# Altium schematic symbol library BlackfinSOM.SchLib: 36 symbols
Pins are listed as number, name and electrical type; pins without a type are passive.

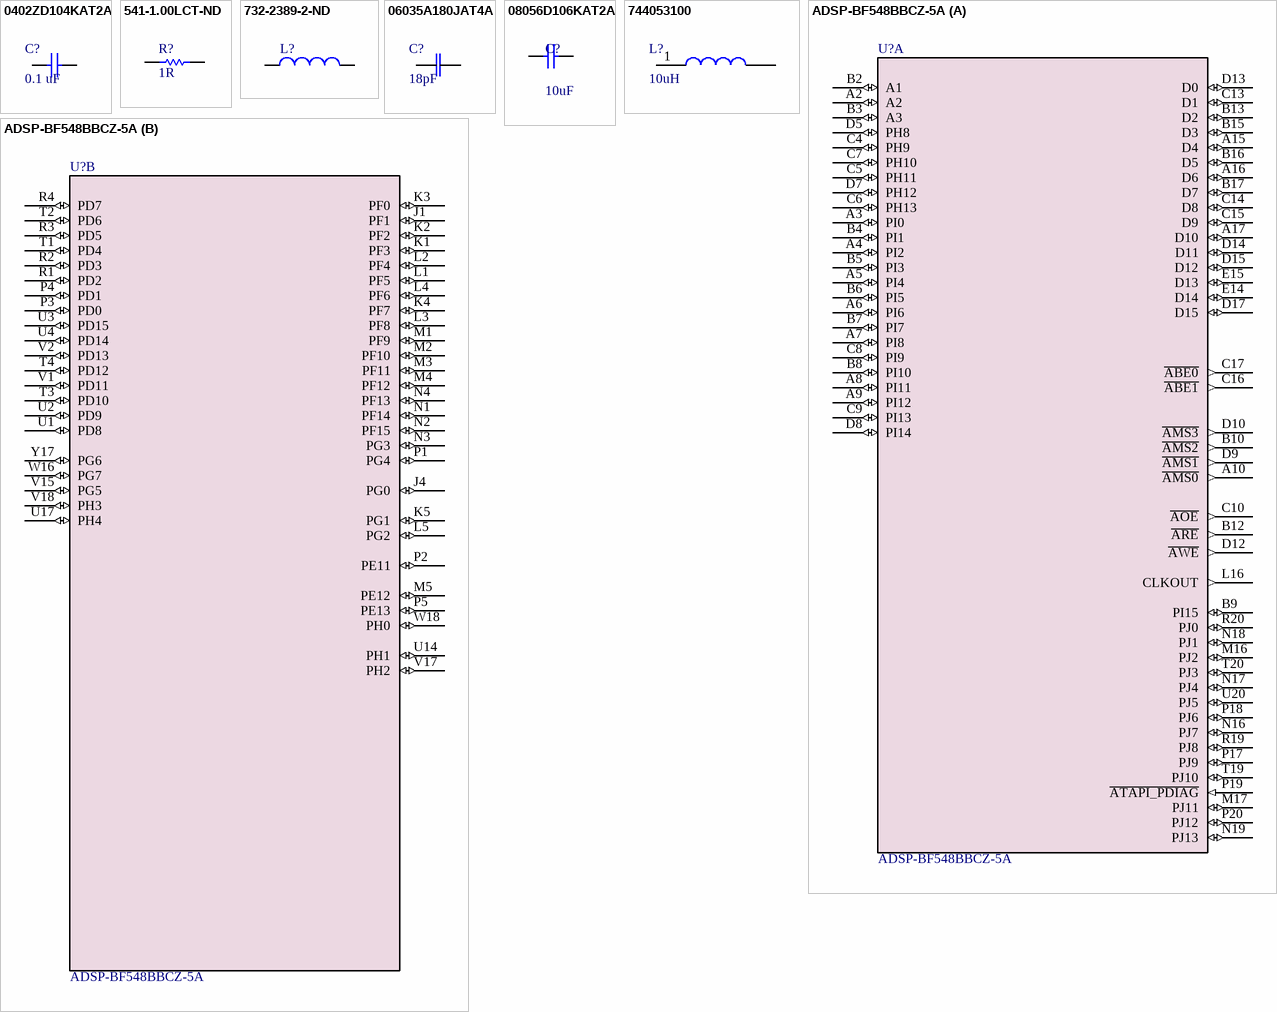
[diagram p0: symbols 0402ZD104KAT2A to ADSP-BF548BBCZ-5A]

## 0402ZD104KAT2A
designator C?, comment 0.1 uF
Chip Capacitor, 0.1 uF, +/- 10%, 10 V, -55 to 85 degC, 0402 (1005 Metric), RoHS, Tape and Reel; Voltage Rating: 10 V; Capacitance: 100 nF; Case\Package: 0402; Type (Capacitors): X5R; Min Operating Temperature: -55 degC; Max Operating Temperature: 85 degC; ComponentLink2URL: http://datasheets.avx.com/cx5r.pdf; Packaging: Cut Tape; Tolerance: 10%; Pins: 2; Case Code (Imperial): 0402; PackageDescription: 2-Pin Surface Mount Device, Body 1 x 0.5 mm; ComponentLink1Description: Manufacturer URL; DatasheetVersion: 05/2016; Width: 0.5 mm; ComponentLink1URL: http://www.avx.com/; Length: 1 mm; Package Quantity: 1; PackageReference: 0402; Mount: Surface Mount; Radiation Hardening: No; REACH SVHC: No SVHC; Mounting Technology: Surface Mount; ComponentLink2Description: Datasheet; RoHSCompliant: true; Case Code (Metric): 1005; Height: 0.56 mm; Voltage Rating (DC): 10 V
footprint CAP0402
pins: 1, 2

## 541-1.00LCT-ND
designator R?, comment 1R
RES SMD 1 OHM 1% 1/16W 0402; Manufacturer: Vishay; Manufacturer Part Number: CRCW04021R00FNED; Power Rating: 63mW; Voltage Rating: 50V; Temperature Coefficient: 200ppm/°C; Supplier 1: Digi-Key; RoHS: Yes; Category: Chip SMD Resistors; Stock 1: 7772; Pricing 1: 1=0.10000, 10=0.05000, 100=0.02040, 1000=0.00914, 2500=0.00794, 5000=0.00656 (USD); Mount: Surface Mount; Case/Package: 0402; Number of Pins: 2; Weight: 2.3E-05oz; Case Code (Metric): 1005; Case Code (Imperial): 0402; Contact Plating: Tin; Min Operating Temperature: -55°C; Max Operating Temperature: 155°C; Resistance: 1R; Tolerance: 1%; Packaging: Tape and Reel; Package Quantity: 10000; Resistor Type: Thick Film; Number of Terminations: 2; Termination: SMD/SMT; Max Power Dissipation: 63mW; Voltage Rating (DC): 50V; Features: Automotive AEC-Q200; Length: 1mm; Width: 0.02inch; Height: 0.016inch; Depth: 0.5mm; Radiation Hardening: No; REACH SVHC: Unknown; Military Standard: Not; Lead Free: Lead Free; ComponentLink1URL: https://datasheet.ciiva.com/2560/dcrcwe3-2560101.pdf?src-supplier=Digi-Key; ComponentLink1Description: https://datasheet.ciiva.com/2560/dcrcwe3-2560101.pdf?src-supplier=Digi-Key; ComponentLink2URL: https://datasheet.ciiva.com/6027/1697337-6027861.pdf?src-supplier=Farnell; ComponentLink2Description: https://datasheet.ciiva.com/6027/1697337-6027861.pdf?src-supplier=Farnell; ComponentLink3URL: https://datasheet.ciiva.com/2560/dcrcwe3-2560102.pdf?src-supplier=Digi-Key; ComponentLink3Description: https://datasheet.ciiva.com/2560/dcrcwe3-2560102.pdf?src-supplier=Digi-Key; ComponentLink4URL: https://datasheet.ciiva.com/2560/dcrcwe3-2560103.pdf?src-supplier=Digi-Key; ComponentLink4Description: https://datasheet.ciiva.com/2560/dcrcwe3-2560103.pdf?src-supplier=Digi-Key; ComponentLink5URL: https://datasheet.ciiva.com/3256/dcrcwe3-3256199.pdf?src-supplier=Avnet; ComponentLink5Description: https://datasheet.ciiva.com/3256/dcrcwe3-3256199.pdf?src-supplier=Avnet; ComponentLink6URL: https://datasheet.ciiva.com/3256/dcrcwe3-3256200.pdf?src-supplier=Avnet; ComponentLink6Description: https://datasheet.ciiva.com/3256/dcrcwe3-3256200.pdf?src-supplier=Avnet; ComponentLink7URL: https://datasheet.ciiva.com/5552/dcrcwe3-109170-5552232.pdf?src-supplier=Mouser; ComponentLink7Description: https://datasheet.ciiva.com/5552/dcrcwe3-109170-5552232.pdf?src-supplier=Mouser; ComponentLink8URL: https://datasheet.ciiva.com/16436/dcrcwe3-16436173.pdf?src-supplier=Future+Electronics; ComponentLink8Description: https://datasheet.ciiva.com/16436/dcrcwe3-16436173.pdf?src-supplier=Future+Electronics; ComponentLink9URL: https://datasheet.ciiva.com/7841/125364-7841807.pdf?src-supplier=Element14; ComponentLink9Description: https://datasheet.ciiva.com/7841/125364-7841807.pdf?src-supplier=Element14
footprint RES0402
pins: 1, 2
1 alternate drawing of the same symbol

## 732-2389-2-ND
designator L?, comment 600 Ohms @ 100MHz  (value not drawn)
Ferritperle, 0603 [Metrisch 1608], 600 ohm, 500 mA, WE-CBF HF Series, 0.35 ohm, ± 25%; Manufacturer: Wurth Electronics; Manufacturer Part Number: 742863160; Impedance: 600 Ohm; Core Material: Ferrite; Resistance: 350mR; Max Current Rating: 500mA; Number of Lines: 1; PackageDescription: Chip Inductor, 2-Leads, Body 1.6 x 0.8 mm; PackageReference: SMD-0603; DatasheetVersion: ver 2, Aug-2009; ComponentLink1URL: http://www.we-online.com; ComponentLink2URL: http://www.we-online.de/katalog/media/pdf/742863160.pdf; ComponentLink2Description: Datasheet; ComponentLink1Description: Manufacturer Link; PackageVersion: 2009; Supplier 1: Digi-Key; RoHS: Yes; Category: Ferrite Beads and Chips; Stock 1: 26940; Pricing 1: 1=0.22000, 50=0.21200, 100=0.20200, 500=0.18100, 1000=0.17100, 2000=0.16100 (USD); Mount: Surface Mount; Case/Package: SMD/SMT; Number of Pins: 2; Case Code (Metric): 1608; Case Code (Imperial): 0603; Min Operating Temperature: -55°C; Max Operating Temperature: 125°C; Package Quantity: 1; Packaging: Tape and Reel; Tolerance: 25%; Max DC Current: 500mA; DC Resistance (DCR): 350mR; Termination: SMD/SMT; Test Frequency: 100MHz; Length: 1.6mm; Width: 0.8mm; Height: 0.8mm; Depth: 0.8mm; REACH SVHC: Unknown; Lead Free: Lead Free; ComponentLink3URL: https://datasheet.ciiva.com/4939/742863160-51474-4939408.pdf?src-supplier=Mouser; ComponentLink3Description: https://datasheet.ciiva.com/4939/742863160-51474-4939408.pdf?src-supplier=Mouser; ComponentLink4URL: https://datasheet.ciiva.com/23763/742863160-23763056.pdf?src-supplier=Newark; ComponentLink4Description: https://datasheet.ciiva.com/23763/742863160-23763056.pdf?src-supplier=Newark; ComponentLink5URL: https://datasheet.ciiva.com/30490/0900766b812a6726-30490032.pdf?src-supplier=RSComponents; ComponentLink5Description: https://datasheet.ciiva.com/30490/0900766b812a6726-30490032.pdf?src-supplier=RSComponents; ComponentLink6URL: https://datasheet.ciiva.com/6212/742863160-6212664.pdf?src-supplier=Digi-Key; ComponentLink6Description: https://datasheet.ciiva.com/6212/742863160-6212664.pdf?src-supplier=Digi-Key; ComponentLink7URL: https://datasheet.ciiva.com/1466/1696149-1466636.pdf?src-supplier=Element14; ComponentLink7Description: https://datasheet.ciiva.com/1466/1696149-1466636.pdf?src-supplier=Element14; ComponentLink8URL: https://datasheet.ciiva.com/6212/742863160-6212666.pdf?src-supplier=Digi-Key; ComponentLink8Description: https://datasheet.ciiva.com/6212/742863160-6212666.pdf?src-supplier=Digi-Key; ComponentLink9URL: https://datasheet.ciiva.com/6212/742863160-6212667.pdf?src-supplier=Digi-Key; ComponentLink9Description: https://datasheet.ciiva.com/6212/742863160-6212667.pdf?src-supplier=Digi-Key; ComponentLink10URL: https://datasheet.ciiva.com/22711/1696149-22711452.pdf?src-supplier=Element14; ComponentLink10Description: https://datasheet.ciiva.com/22711/1696149-22711452.pdf?src-supplier=Element14
footprint IND-0603 (Chip Inductor, 2-Leads, Body 1.6x0.8mm)
pins: 1, 2

## 06035A180JAT4A
designator C?, comment 18pF
18pF ±5% 50V Ceramic Capacitor C0G, NP0 0603 (1608 Metric); Manufacturer: AVX Corporation; Manufacturer Product Number: 06035A180JAT4A; Capacitance: AVX_2016-12-14_1; Digi-Key Part Number: 478-10294-2-ND; Supplier: AVX Corporation; Package / Case: 0603 (1608 Metric)
footprint CAP0603
pins: 1, 2

## 08056D106KAT2A
designator C?, comment 10uF
Cap Ceramic 10uF 6.3V X5R 10% SMD 0805 85C Embossed T/R; Part Number: 08056D106KAT2A; Manufacturer: AVX Interconnect / Elco; Insulation Resistance: 500MR; Supplier 1: Digi-Key; Category: Ceramic Capacitors; Manufacturer Part Number: 08056D106KAT2A; RoHS: Yes; Stock 1: 132568; Pricing 1: 1=0.24000, 10=0.16300, 50=0.09800, 100=0.08280, 500=0.05662, 1000=0.05009 (USD); Mount: Surface Mount,PCB; Case/Package: 0805; Number of Pins: 2; Case Code (Imperial): 0805; Case Code (Metric): 2012; Dielectric Material: Ceramic; Min Operating Temperature: -55°C; Max Operating Temperature: 85°C; Capacitance: 10uF; Tolerance: 10%; Dielectric: X5R; Voltage Rating (DC): 6.3V; Packaging: Tape and Reel; Voltage: 6.3V; Package Quantity: 1; Voltage Rating: 6.3V; Termination: SMD/SMT; Length: 2.01mm; Width: 1.25mm; Height: 1.4mm; Depth: 1.25mm; Thickness: 0.055inch; Radiation Hardening: No; REACH SVHC: No SVHC; Lead Free: Lead Free; ComponentLink1URL: https://datasheet.ciiva.com/11788/0900766b80def1a5-11788549.pdf?src-supplier=RSComponents; ComponentLink1Description: https://datasheet.ciiva.com/11788/0900766b80def1a5-11788549.pdf?src-supplier=RSComponents
footprint CAP0805
pins: 1, 2
1 alternate drawing of the same symbol

## 744053100
designator L?, comment 10uH
10µH Shielded Wirewound Inductor 1.5A 70mOhm Max 2323 (5858 Metric); Manufacturer: Würth Elektronik; Manufacturer Product Number: 744053100; Current Rating: 1,5A; Digi-Key Part Number: 732-1043-2-ND; Package / Case: 2323 (5858 Metric); Inductance: 10µH
footprint IND_5818_WE-TPC
pins: 1, 2

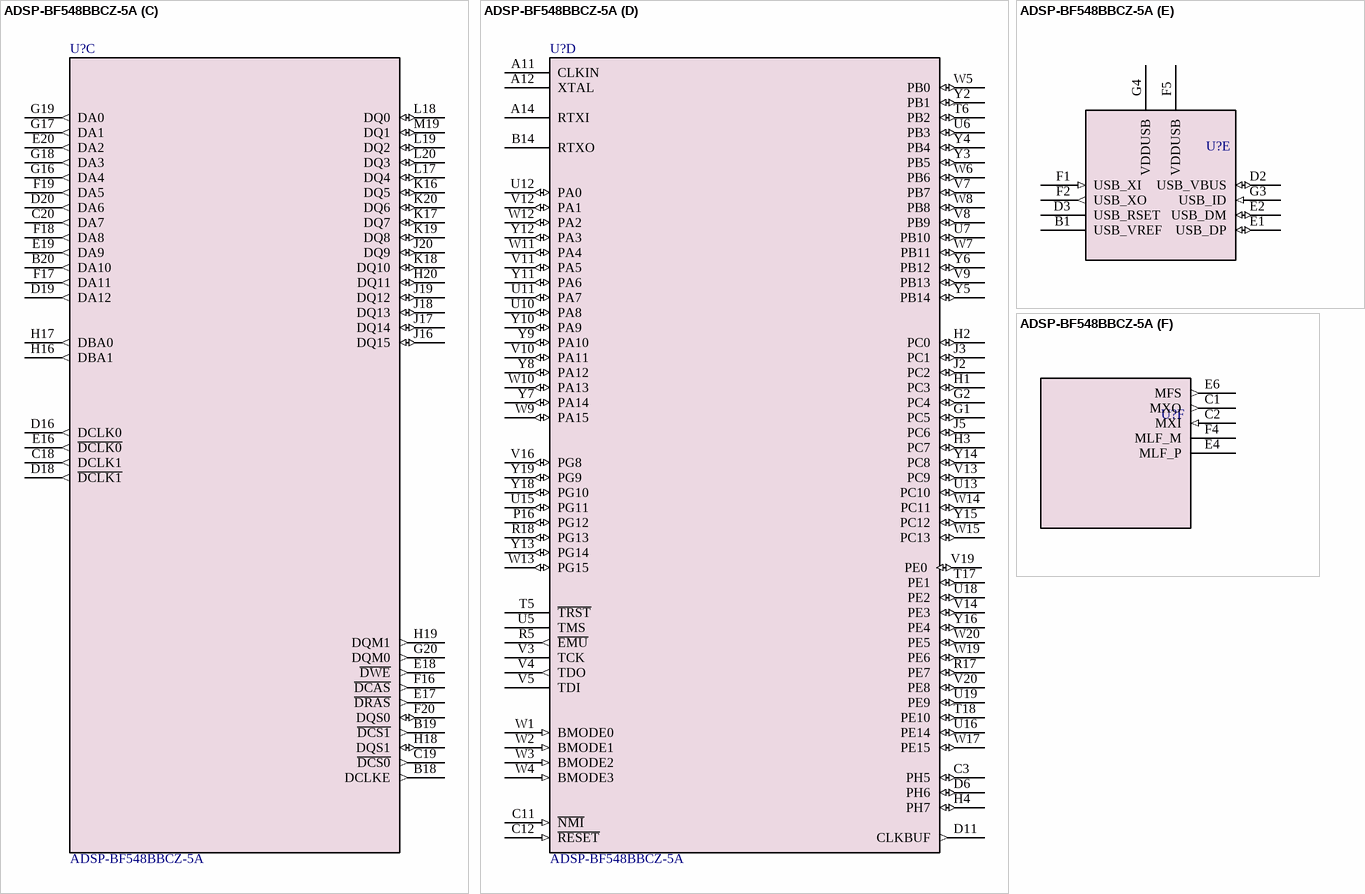
[diagram p1: symbol ADSP-BF548BBCZ-5A]

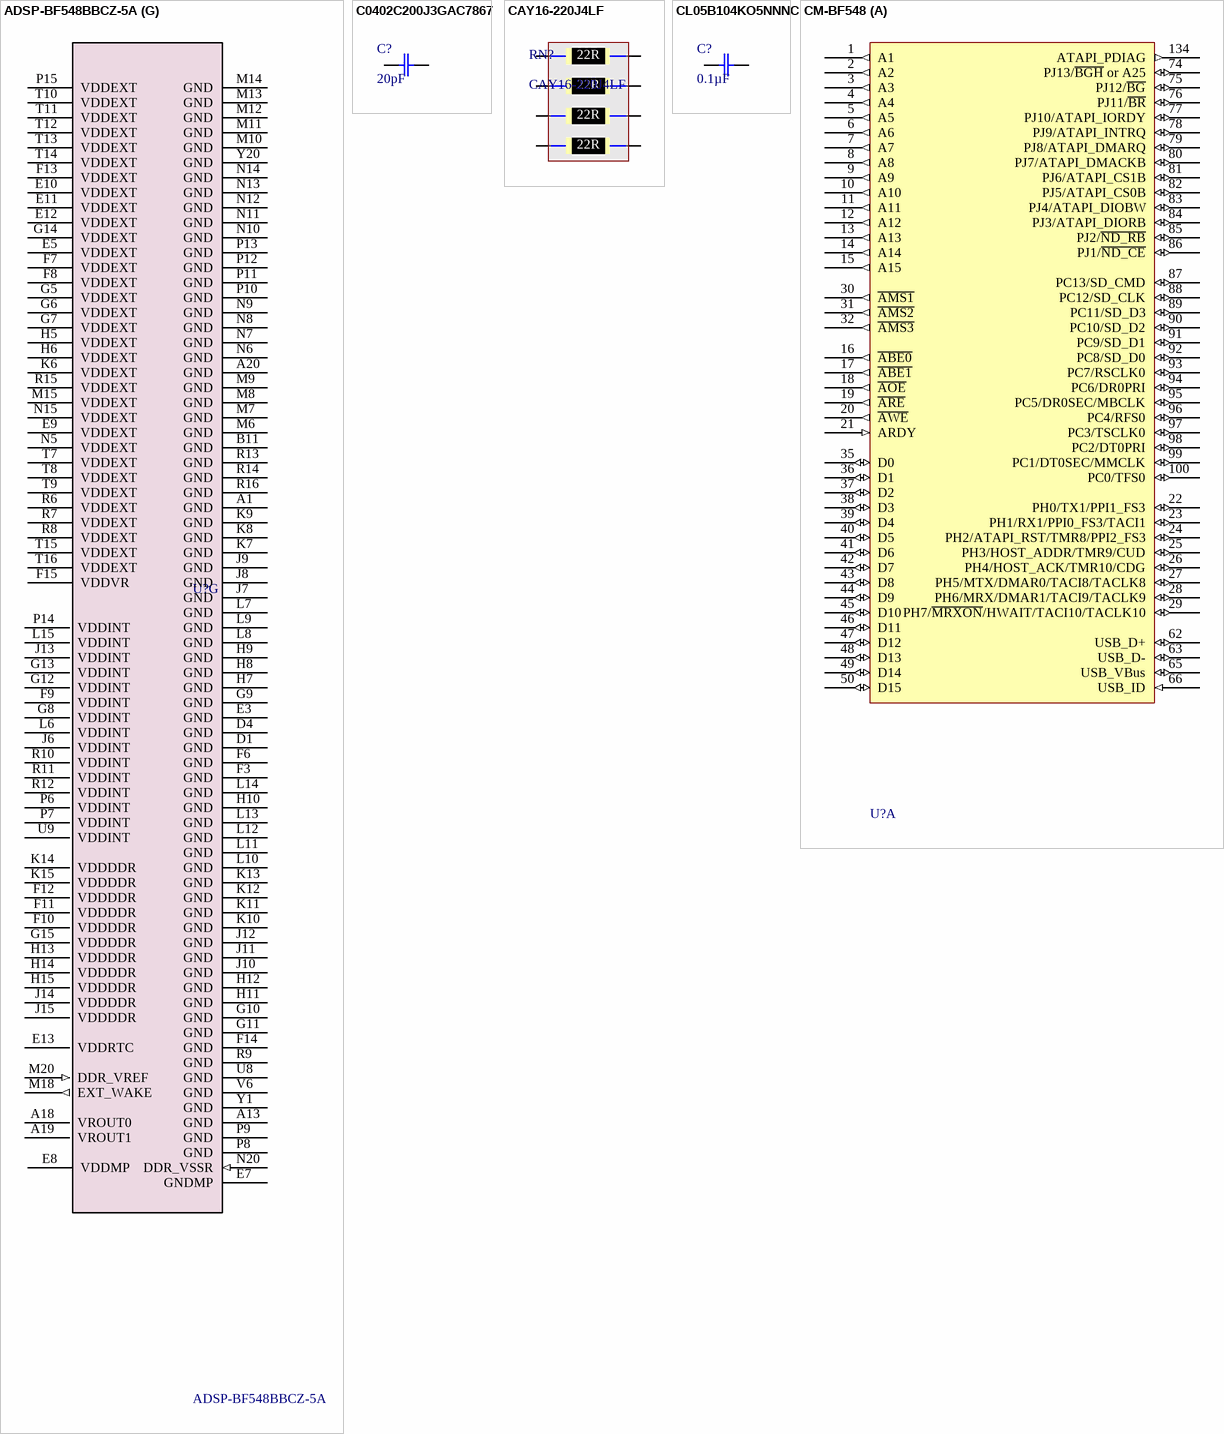
[diagram p2: symbols ADSP-BF548BBCZ-5A to CM-BF548]

## ADSP-BF548BBCZ-5A
designator U?
IC DSP 16BIT 533MHZ 400CSBGA; Manufacturer: Analog Devices Inc.; Manufacturer_Part_Number: ADSP-BF548BBCZ-5A; Supplier: Analog Devices Inc.; Manufacturer Product Number: ADSP-BF548BBCZ-5A; TypeDigi-Key Part Number: ADSP-BF548BBCZ-5A-ND
footprint BC_400_1_ADI
part A pins: A2 (io), A3 PI0 (io), A4 PI2 (io), A5 PI4 (io), A6 PI6 (io), A7 PI8 (io), A8 PI11 (io), A9 PI12 (io), A10 ~{AMS0} (out), A15 D4 (io), A16 D6 (io), A17 D10 (io), B2 A1 (io), B3 A3 (io), B4 PI1 (io), B5 PI3 (io), B6 PI5 (io), B7 PI7 (io), B8 PI10 (io), B9 PI15 (io), B10 ~{AMS2} (out), B12 ~{ARE} (out), B13 D2 (io), B15 D3 (io), B16 D5 (io), B17 D7 (io), C4 PH9 (io), C5 PH11 (io), C6 PH13 (io), C7 PH10 (io), C8 PI9 (io), C9 PI13 (io), C10 ~{AOE} (out), C13 D1 (io), C14 D8 (io), C15 D9 (io), C16 ~{ABE1} (out), C17 ~{ABE0} (out), D5 PH8 (io), D7 PH12 (io), D8 PI14 (io), D9 ~{AMS1} (out), D10 ~{AMS3} (out), D12 ~{AWE} (out), D13 D0 (io), D14 D11 (io), D15 D12 (io), D17 D15 (io), E14 D14 (io), E15 D13 (io), L16 CLKOUT (out), M16 PJ2 (io), M17 PJ11 (io), N16 PJ7 (io), N17 PJ4 (io), N18 PJ1 (io), N19 PJ13 (io), P17 PJ9 (io), P18 PJ6 (io), P19 ~{ATAPI_PDIAG} (in), P20 PJ12 (io), R19 PJ8 (io), R20 PJ0 (io), T19 PJ10 (io), T20 PJ3 (io), U20 PJ5 (io)
part B pins: J1 PF1 (io), J4 PG0 (io), K1 PF3 (io), K2 PF2 (io), K3 PF0 (io), K4 PF7 (io), K5 PG1 (io), L1 PF5 (io), L2 PF4 (io), L3 PF8 (io), L4 PF6 (io), L5 PG2 (io), M1 PF9 (io), M2 PF10 (io), M3 PF11 (io), M4 PF12 (io), M5 PE12 (io), N1 PF14 (io), N2 PF15 (io), N3 PG3 (io), N4 PF13 (io), P1 PG4 (io), P2 PE11 (io), P3 PD0 (io), P4 PD1 (io), P5 PE13 (io), R1 PD2 (io), R2 PD3 (io), R3 PD5 (io), R4 PD7 (io), T1 PD4 (io), T2 PD6 (io), T3 PD10 (io), T4 PD12 (io), U1 PD8 (io), U2 PD9 (io), U3 PD15 (io), U4 PD14 (io), U14 PH1 (io), U17 PH4 (io), V1 PD11 (io), V2 PD13 (io), V15 PG5 (io), V17 PH2 (io), V18 PH3 (io), W16 PG7 (io), W18 PH0 (io), Y17 PG6 (io)
part C pins: B18 DCLKE (out), B19 ~{DCS1} (out), B20 DA10 (out), C18 DCLK1 (out), C19 ~{DCS0} (out), C20 DA7 (out), D16 DCLK0 (out), D18 ~{DCLK1} (out), D19 DA12 (out), D20 DA6 (out), E16 ~{DCLK0} (out), E17 ~{DRAS} (out), E18 ~{DWE} (out), E19 DA9 (out), E20 DA2 (out), F16 ~{DCAS} (out), F17 DA11 (out), F18 DA8 (out), F19 DA5 (out), F20 DQS0 (io), G16 DA4 (out), G17 DA1 (out), G18 DA3 (out), G19 DA0 (out), G20 DQM0 (out), H16 DBA1 (out), H17 DBA0 (out), H18 DQS1 (io), H19 DQM1 (out), H20 DQ11 (io), J16 DQ15 (io), J17 DQ14 (io), J18 DQ13 (io), J19 DQ12 (io), J20 DQ9 (io), K16 DQ5 (io), K17 DQ7 (io), K18 DQ10 (io), K19 DQ8 (io), K20 DQ6 (io), L17 DQ4 (io), L18 DQ0 (io), L19 DQ2 (io), L20 DQ3 (io), M19 DQ1 (io)
part D pins: A11 CLKIN, A12 XTAL, A14 RTXI, B14 RTXO, C3 PH5 (io), C11 ~{NMI} (in), C12 ~{RESET} (in), D6 PH6 (io), D11 CLKBUF (out), G1 PC5 (io), G2 PC4 (io), H1 PC3 (io), H2 PC0 (io), H3 PC7 (io), H4 PH7 (io), J2 PC2 (io), J3 PC1 (io), J5 PC6 (io), P16 PG12 (io), R5 ~{EMU} (out), R17 PE7 (io), R18 PG13 (io), T5 ~{TRST}, T6 PB2 (io), T17 PE1 (io), T18 PE10 (io), U5 TMS, U6 PB3 (io), U7 PB10 (io), U10 PA8 (io), U11 PA7 (io), U12 PA0 (io), U13 PC10 (io), U15 PG11 (io), U16 PE14 (io), U18 PE2 (io), U19 PE9 (io), V3 TCK, V4 TDO (out), V5 TDI, V7 PB7 (io), V8 PB9 (io), V9 PB13 (io), V10 PA11 (io), V11 PA5 (io), V12 PA1 (io), V13 PC9 (io), V14 PE3 (io), V16 PG8 (io), V19 PE0 (io), V20 PE8 (io), W1 BMODE0 (in), W2 BMODE1 (in), W3 BMODE2 (in), W4 BMODE3 (in), W5 PB0 (io), W6 PB6 (io), W7 PB11 (io), W8 PB8 (io), W9 PA15 (io), W10 PA13 (io), W11 PA4 (io), W12 PA2 (io), W13 PG15 (io), W14 PC11 (io), W15 PC13 (io), W17 PE15 (io), W19 PE6 (io), W20 PE5 (io), Y2 PB1 (io), Y3 PB5 (io), Y4 PB4 (io), Y5 PB14 (io), Y6 PB12 (io), Y7 PA14 (io), Y8 PA12 (io), Y9 PA10 (io), Y10 PA9 (io), Y11 PA6 (io), Y12 PA3 (io), Y13 PG14 (io), Y14 PC8 (io), Y15 PC12 (io), Y16 PE4 (io), Y18 PG10 (io), Y19 PG9 (io)
part E pins: B1 USB_VREF, D2 USB_VBUS (io), D3 USB_RSET, E1 USB_DP (io), E2 USB_DM (io), F1 USB_XI (in), F2 USB_XO (out), F5 VDDUSB (power), G3 USB_ID (in), G4 VDDUSB (power)
part F pins: C1 MXO (out), C2 MXI (in), E4 MLF_P, E6 MFS (out), F4 MLF_M
part G pins: A1 GND (power), A13 GND (power), A18 VROUT0 (power), A19 VROUT1 (power), A20 GND (power), B11 GND (power), D1 GND (power), D4 GND (power), E3 GND (power), E5 VDDEXT (power), E7 GNDMP (power), E8 VDDMP (power), E9 VDDEXT (power), E10 VDDEXT (power), E11 VDDEXT (power), E12 VDDEXT (power), E13 VDDRTC (power), F3 GND (power), F6 GND (power), F7 VDDEXT (power), F8 VDDEXT (power), F9 VDDINT (power), F10 VDDDDR (power), F11 VDDDDR (power), F12 VDDDDR (power), F13 VDDEXT (power), F14 GND (power), F15 VDDVR (power), G5 VDDEXT (power), G6 VDDEXT (power), G7 VDDEXT (power), G8 VDDINT (power), G9 GND (power), G10 GND (power), G11 GND (power), G12 VDDINT (power), G13 VDDINT (power), G14 VDDEXT (power), G15 VDDDDR (power), H5 VDDEXT (power), H6 VDDEXT (power), H7 GND (power), H8 GND (power), H9 GND (power), H10 GND (power), H11 GND (power), H12 GND (power), H13 VDDDDR (power), H14 VDDDDR (power), H15 VDDDDR (power), J6 VDDINT (power), J7 GND (power), J8 GND (power), J9 GND (power), J10 GND (power), J11 GND (power), J12 GND (power), J13 VDDINT (power), J14 VDDDDR (power), J15 VDDDDR (power), K6 VDDEXT (power), K7 GND (power), K8 GND (power), K9 GND (power), K10 GND (power), K11 GND (power), K12 GND (power), K13 GND (power), K14 VDDDDR (power), K15 VDDDDR (power), L6 VDDINT (power), L7 GND (power), L8 GND (power), L9 GND (power), L10 GND (power), L11 GND (power), L12 GND (power), L13 GND (power), L14 GND (power), L15 VDDINT (power), M6 GND (power), M7 GND (power), M8 GND (power), M9 GND (power), M10 GND (power), M11 GND (power), M12 GND (power), M13 GND (power), M14 GND (power), M15 VDDEXT (power), M18 EXT_WAKE (out), M20 DDR_VREF (in), N5 VDDEXT (power), N6 GND (power), N7 GND (power), N8 GND (power), N9 GND (power), N10 GND (power), N11 GND (power), N12 GND (power), N13 GND (power), N14 GND (power), N15 VDDEXT (power), N20 DDR_VSSR (in), P6 VDDINT (power), P7 VDDINT (power), P8 GND (power), P9 GND (power), P10 GND (power), P11 GND (power), P12 GND (power), P13 GND (power), P14 VDDINT (power), P15 VDDEXT (power), R6 VDDEXT (power), R7 VDDEXT (power), R8 VDDEXT (power), R9 GND (power), R10 VDDINT (power), R11 VDDINT (power), R12 VDDINT (power), R13 GND (power), R14 GND (power), R15 VDDEXT (power), R16 GND (power), T7 VDDEXT (power), T8 VDDEXT (power), T9 VDDEXT (power), T10 VDDEXT (power), T11 VDDEXT (power), T12 VDDEXT (power), T13 VDDEXT (power), T14 VDDEXT (power), T15 VDDEXT (power), T16 VDDEXT (power), U8 GND (power), U9 VDDINT (power), V6 GND (power), Y1 GND (power), Y20 GND (power)

## C0402C200J3GAC7867
designator C?, comment 20pF
20pF ±5% 25V Ceramic Capacitor C0G, NP0 0402 (1005 Metric); Manufacturer Part Number: C0402C200J3GAC7867; Vendor: Kemet; Tolerance: ±5%; Voltage - Rated: 25V; Temperature Coefficient: C0G, NP0; Operating Temperature: -55°C ~ 125°C; Package: 0402; Capacitance: 20pF
footprint CAPC10555_55N_KEM-L
pins: 1, 2

## CAY16-220J4LF
designator RN?
22 Ohm ±5% 62.5mW Power Per Element Isolated Resistor Network/Array ±200ppm/°C 1206 (3216 Metric), Convex, Long Side Terminals; Manufacturer: Bourns Inc.; Manufacturer Product Number: CAY16-220J4LF; Power Per Element: 62.5mW; Tolerance: ±5%; Digi-Key Part Number: CAY16-220J4LFDKR-ND
footprint BO_CAY16
pins: 1, 2, 3, 4, 5, 6, 7, 8
text: 22R

## CL05B104KO5NNNC
designator C?, comment 0.1µF
0.1µF ±10% 16V Ceramic Capacitor X7R 0402 (1005 Metric); Manufacturer: Samsung Electro-Mechanics; Manufacturer Product Number: CL05B104KO5NNNC; Digi-Key Part Number: 1276-1001-2-ND; Capacitance: 0.1µF; Package / Case: 0402 (1005 Metric)
footprint CAP0402
pins: 1, 2

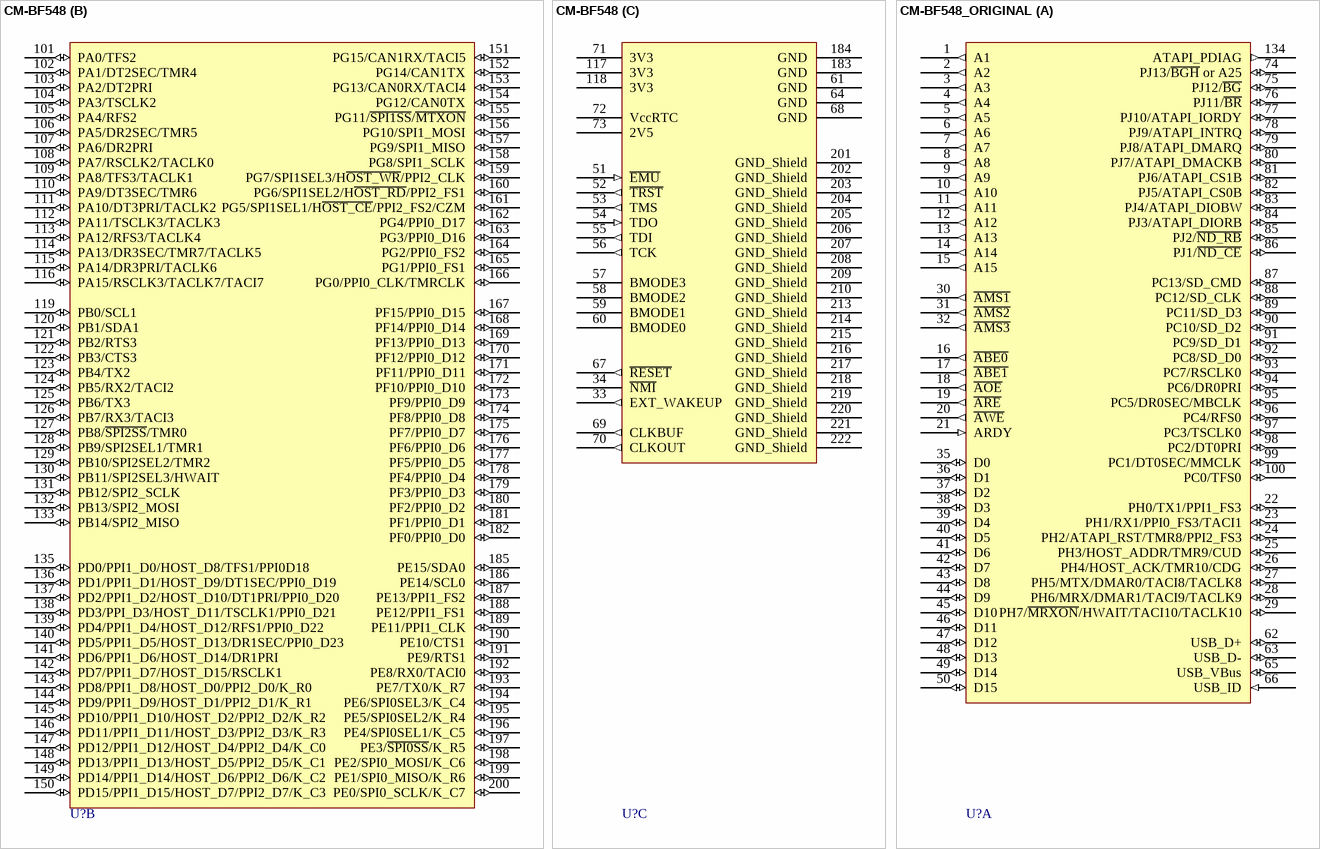
[diagram p3: symbols CM-BF548 to CM-BF548_ORIGINAL]

## CM-BF548
designator U?  (value not drawn)
footprint CM-BF548
footprint CM-BF548-ORIGIN
part A pins: 1 A1 (out), 2 A2 (out), 3 A3 (out), 4 A4 (out), 5 A5 (out), 6 A6 (out), 7 A7 (out), 8 A8 (out), 9 A9 (out), 10 A10 (out), 11 A11 (out), 12 A12 (out), 13 A13 (out), 14 A14 (out), 15 A15 (out), 16 ~{ABE0} (out), 17 ~{ABE1} (out), 18 ~{AOE} (out), 19 ~{ARE} (out), 20 ~{AWE} (out), 21 ARDY (in), 22 PH0/TX1/PPI1_FS3 (io), 23 PH1/RX1/PPI0_FS3/TACI1 (io), 24 PH2/ATAPI_RST/TMR8/PPI2_FS3 (io), 25 PH3/HOST_ADDR/TMR9/CUD (io), 26 PH4/HOST_ACK/TMR10/CDG (io), 27 PH5/MTX/DMAR0/TACI8/TACLK8 (io), 28 PH6/MRX/DMAR1/TACI9/TACLK9 (io), 29 PH7/~{MRXON}/HWAIT/TACI10/TACLK10 (io), 30 ~{AMS1} (out), 31 ~{AMS2} (out), 32 ~{AMS3} (out), 35 D0 (io), 36 D1 (io), 37 D2 (io), 38 D3 (io), 39 D4 (io), 40 D5 (io), 41 D6 (io), 42 D7 (io), 43 D8 (io), 44 D9 (io), 45 D10 (io), 46 D11 (io), 47 D12 (io), 48 D13 (io), 49 D14 (io), 50 D15 (io), 62 USB_D+ (io), 63 USB_D- (io), 65 USB_VBus (io), 66 USB_ID (in), 74 PJ13/~{BGH} or A25 (io), 75 PJ12/~{BG} (io), 76 PJ11/~{BR} (io), 77 PJ10/ATAPI_IORDY (io), 78 PJ9/ATAPI_INTRQ (io), 79 PJ8/ATAPI_DMARQ (io), 80 PJ7/ATAPI_DMACKB (io), 81 PJ6/ATAPI_CS1B (io), 82 PJ5/ATAPI_CS0B (io), 83 PJ4/ATAPI_DIOBW (io), 84 PJ3/ATAPI_DIORB (io), 85 PJ2/~{ND_RB} (io), 86 PJ1/~{ND_CE} (io), 87 PC13/SD_CMD (io), 88 PC12/SD_CLK (io), 89 PC11/SD_D3 (io), 90 PC10/SD_D2 (io), 91 PC9/SD_D1 (io), 92 PC8/SD_D0 (io), 93 PC7/RSCLK0 (io), 94 PC6/DR0PRI (io), 95 PC5/DR0SEC/MBCLK (io), 96 PC4/RFS0 (io), 97 PC3/TSCLK0 (io), 98 PC2/DT0PRI (io), 99 PC1/DT0SEC/MMCLK (io), 100 PC0/TFS0 (io), 134 ATAPI_PDIAG (out)
part B pins: 101 PA0/TFS2 (io), 102 PA1/DT2SEC/TMR4 (io), 103 PA2/DT2PRI (io), 104 PA3/TSCLK2 (io), 105 PA4/RFS2 (io), 106 PA5/DR2SEC/TMR5 (io), 107 PA6/DR2PRI (io), 108 PA7/RSCLK2/TACLK0 (io), 109 PA8/TFS3/TACLK1 (io), 110 PA9/DT3SEC/TMR6 (io), 111 PA10/DT3PRI/TACLK2 (io), 112 PA11/TSCLK3/TACLK3 (io), 113 PA12/RFS3/TACLK4 (io), 114 PA13/DR3SEC/TMR7/TACLK5 (io), 115 PA14/DR3PRI/TACLK6 (io), 116 PA15/RSCLK3/TACLK7/TACI7 (io), 119 PB0/SCL1 (io), 120 PB1/SDA1 (io), 121 PB2/RTS3 (io), 122 PB3/CTS3 (io), 123 PB4/TX2 (io), 124 PB5/RX2/TACI2 (io), 125 PB6/TX3 (io), 126 PB7/RX3/TACI3 (io), 127 PB8/~{SPI2SS}/TMR0 (io), 128 PB9/SPI2SEL1/TMR1 (io), 129 PB10/SPI2SEL2/TMR2 (io), 130 PB11/SPI2SEL3/HWAIT (io), 131 PB12/SPI2_SCLK (io), 132 PB13/SPI2_MOSI (io), 133 PB14/SPI2_MISO (io), 135 PD0/PPI1_D0/HOST_D8/TFS1/PPI0D18 (io), 136 PD1/PPI1_D1/HOST_D9/DT1SEC/PPI0_D19 (io), 137 PD2/PPI1_D2/HOST_D10/DT1PRI/PPI0_D20 (io), 138 PD3/PPI_D3/HOST_D11/TSCLK1/PPI0_D21 (io), 139 PD4/PPI1_D4/HOST_D12/RFS1/PPI0_D22 (io), 140 PD5/PPI1_D5/HOST_D13/DR1SEC/PPI0_D23 (io), 141 PD6/PPI1_D6/HOST_D14/DR1PRI (io), 142 PD7/PPI1_D7/HOST_D15/RSCLK1 (io), 143 PD8/PPI1_D8/HOST_D0/PPI2_D0/K_R0 (io), 144 PD9/PPI1_D9/HOST_D1/PPI2_D1/K_R1 (io), 145 PD10/PPI1_D10/HOST_D2/PPI2_D2/K_R2 (io), 146 PD11/PPI1_D11/HOST_D3/PPI2_D3/K_R3 (io), 147 PD12/PPI1_D12/HOST_D4/PPI2_D4/K_C0 (io), 148 PD13/PPI1_D13/HOST_D5/PPI2_D5/K_C1 (io), 149 PD14/PPI1_D14/HOST_D6/PPI2_D6/K_C2 (io), 150 PD15/PPI1_D15/HOST_D7/PPI2_D7/K_C3 (io), 151 PG15/CAN1RX/TACI5 (io), 152 PG14/CAN1TX (io), 153 PG13/CAN0RX/TACI4 (io), 154 PG12/CAN0TX (io), 155 PG11/~{SPI1SS}/~{MTXON} (io), 156 PG10/SPI1_MOSI (io), 157 PG9/SPI1_MISO (io), 158 PG8/SPI1_SCLK (io), 159 PG7/SPI1SEL3/H~{OST_WR}/PPI2_CLK (io), 160 PG6/SPI1SEL2/H~{OST_RD}/PPI2_FS1 (io), 161 PG5/SPI1SEL1/H~{OST_CE}/PPI2_FS2/CZM (io), 162 PG4/PPI0_D17 (io), 163 PG3/PPI0_D16 (io), 164 PG2/PPI0_FS2 (io), 165 PG1/PPI0_FS1 (io), 166 PG0/PPI0_CLK/TMRCLK (io), 167 PF15/PPI0_D15 (io), 168 PF14/PPI0_D14 (io), 169 PF13/PPI0_D13 (io), 170 PF12/PPI0_D12 (io), 171 PF11/PPI0_D11 (io), 172 PF10/PPI0_D10 (io), 173 PF9/PPI0_D9 (io), 174 PF8/PPI0_D8 (io), 175 PF7/PPI0_D7 (io), 176 PF6/PPI0_D6 (io), 177 PF5/PPI0_D5 (io), 178 PF4/PPI0_D4 (io), 179 PF3/PPI0_D3 (io), 180 PF2/PPI0_D2 (io), 181 PF1/PPI0_D1 (io), 182 PF0/PPI0_D0 (io), 185 PE15/SDA0 (io), 186 PE14/SCL0 (io), 187 PE13/PPI1_FS2 (io), 188 PE12/PPI1_FS1 (io), 189 PE11/PPI1_CLK (io), 190 PE10/CTS1 (io), 191 PE9/RTS1 (io), 192 PE8/RX0/TACI0 (io), 193 PE7/TX0/K_R7 (io), 194 PE6/SPI0SEL3/K_C4 (io), 195 PE5/SPI0SEL2/K_R4 (io), 196 PE4/SPI0SEL1/K_C5 (io), 197 PE3/~{SPI0SS}/K_R5 (io), 198 PE2/SPI0_MOSI/K_C6 (io), 199 PE1/SPI0_MISO/K_R6 (io), 200 PE0/SPI0_SCLK/K_C7 (io)
part C pins: 33 EXT_WAKEUP (out), 34 ~{NMI}, 51 ~{EMU} (in), 52 ~{TRST} (out), 53 TMS (out), 54 TDO (in), 55 TDI (out), 56 TCK (out), 57 BMODE3, 58 BMODE2, 59 BMODE1, 60 BMODE0, 61 GND (power), 64 GND (power), 67 ~{RESET} (out), 68 GND (power), 69 CLKBUF (out), 70 CLKOUT (out), 71 3V3 (power), 72 VccRTC (power), 73 2V5 (power), 117 3V3 (power), 118 3V3 (power), 183 GND (power), 184 GND (power), 201 GND_Shield, 202 GND_Shield, 203 GND_Shield, 204 GND_Shield, 205 GND_Shield, 206 GND_Shield, 207 GND_Shield, 208 GND_Shield, 209 GND_Shield, 210 GND_Shield, 213 GND_Shield, 214 GND_Shield, 215 GND_Shield, 216 GND_Shield, 217 GND_Shield, 218 GND_Shield, 219 GND_Shield, 220 GND_Shield, 221 GND_Shield, 222 GND_Shield

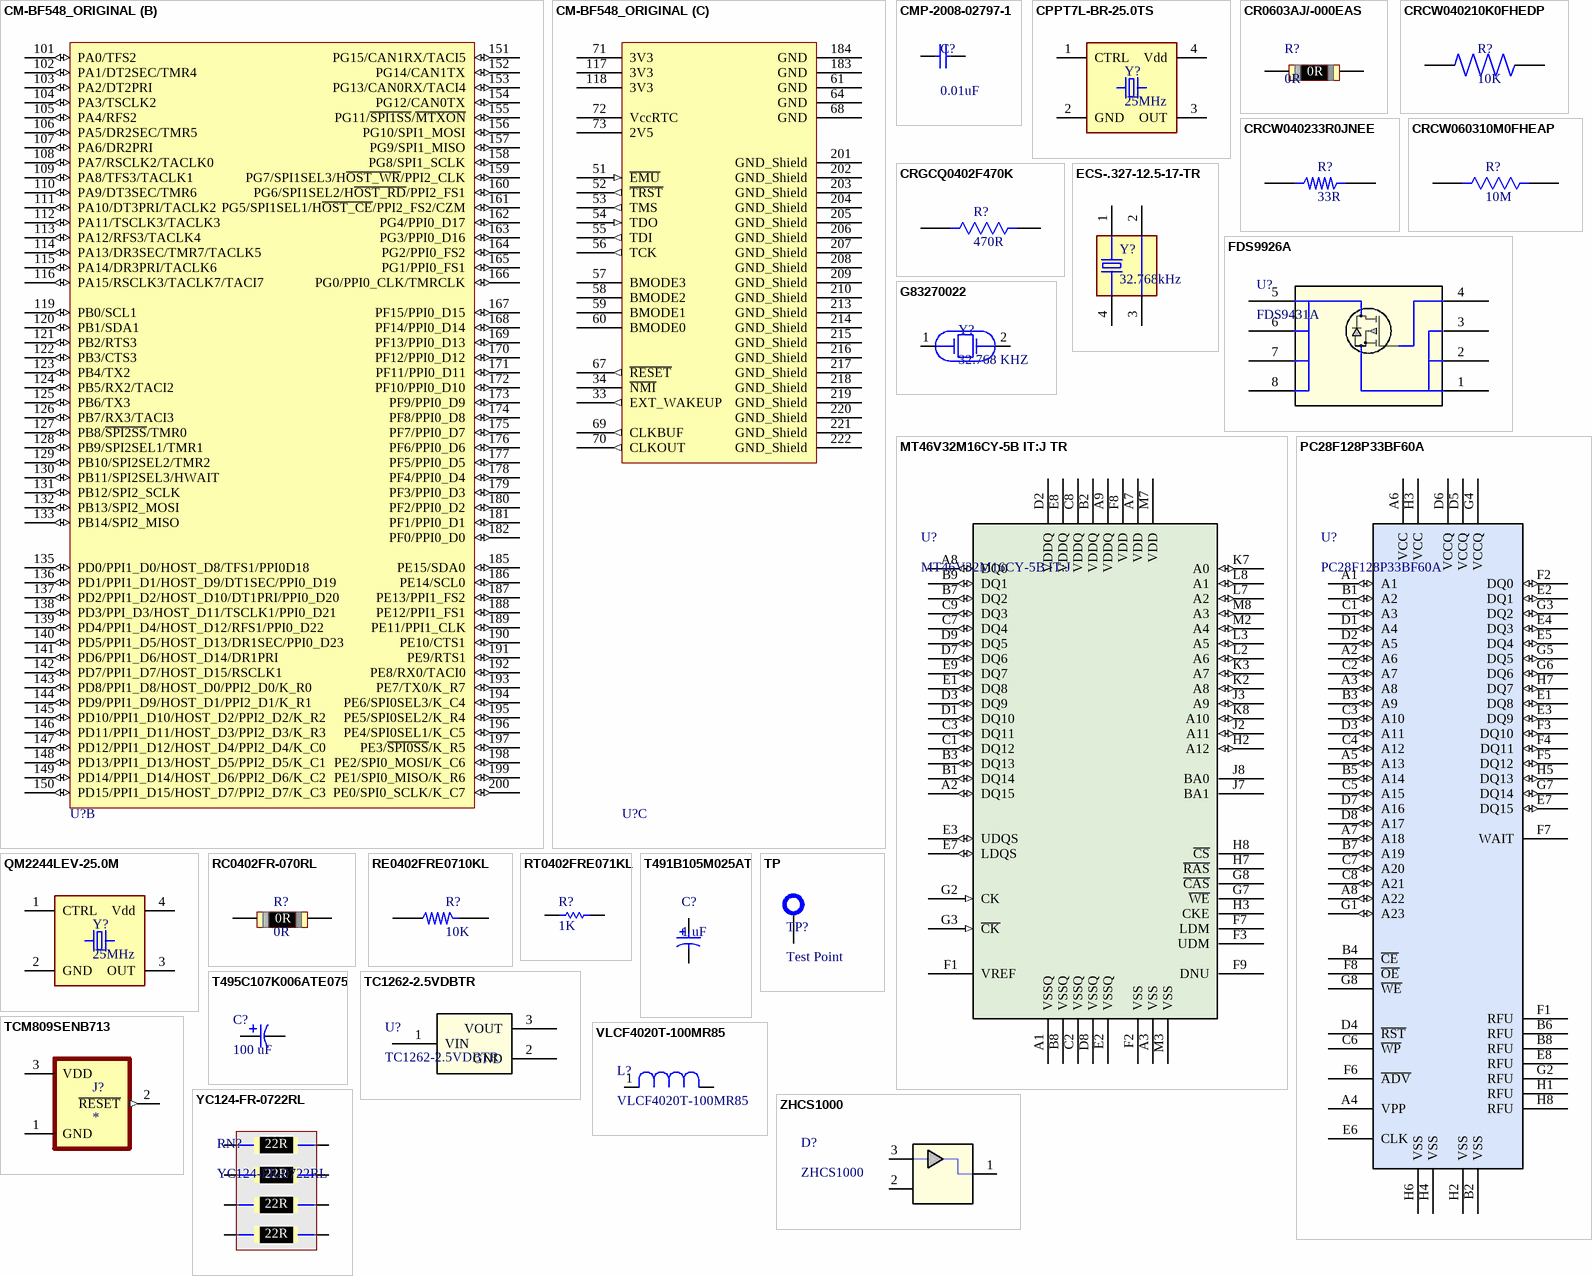
[diagram p4: symbols CM-BF548_ORIGINAL to ZHCS1000]

## CM-BF548_ORIGINAL
designator U?, comment CM-BF548  (value not drawn)
footprint CM-BF548-ORIGIN
part A pins: 1 A1 (out), 2 A2 (out), 3 A3 (out), 4 A4 (out), 5 A5 (out), 6 A6 (out), 7 A7 (out), 8 A8 (out), 9 A9 (out), 10 A10 (out), 11 A11 (out), 12 A12 (out), 13 A13 (out), 14 A14 (out), 15 A15 (out), 16 ~{ABE0} (out), 17 ~{ABE1} (out), 18 ~{AOE} (out), 19 ~{ARE} (out), 20 ~{AWE} (out), 21 ARDY (in), 22 PH0/TX1/PPI1_FS3 (io), 23 PH1/RX1/PPI0_FS3/TACI1 (io), 24 PH2/ATAPI_RST/TMR8/PPI2_FS3 (io), 25 PH3/HOST_ADDR/TMR9/CUD (io), 26 PH4/HOST_ACK/TMR10/CDG (io), 27 PH5/MTX/DMAR0/TACI8/TACLK8 (io), 28 PH6/MRX/DMAR1/TACI9/TACLK9 (io), 29 PH7/~{MRXON}/HWAIT/TACI10/TACLK10 (io), 30 ~{AMS1} (out), 31 ~{AMS2} (out), 32 ~{AMS3} (out), 35 D0 (io), 36 D1 (io), 37 D2 (io), 38 D3 (io), 39 D4 (io), 40 D5 (io), 41 D6 (io), 42 D7 (io), 43 D8 (io), 44 D9 (io), 45 D10 (io), 46 D11 (io), 47 D12 (io), 48 D13 (io), 49 D14 (io), 50 D15 (io), 62 USB_D+ (io), 63 USB_D- (io), 65 USB_VBus (io), 66 USB_ID (in), 74 PJ13/~{BGH} or A25 (io), 75 PJ12/~{BG} (io), 76 PJ11/~{BR} (io), 77 PJ10/ATAPI_IORDY (io), 78 PJ9/ATAPI_INTRQ (io), 79 PJ8/ATAPI_DMARQ (io), 80 PJ7/ATAPI_DMACKB (io), 81 PJ6/ATAPI_CS1B (io), 82 PJ5/ATAPI_CS0B (io), 83 PJ4/ATAPI_DIOBW (io), 84 PJ3/ATAPI_DIORB (io), 85 PJ2/~{ND_RB} (io), 86 PJ1/~{ND_CE} (io), 87 PC13/SD_CMD (io), 88 PC12/SD_CLK (io), 89 PC11/SD_D3 (io), 90 PC10/SD_D2 (io), 91 PC9/SD_D1 (io), 92 PC8/SD_D0 (io), 93 PC7/RSCLK0 (io), 94 PC6/DR0PRI (io), 95 PC5/DR0SEC/MBCLK (io), 96 PC4/RFS0 (io), 97 PC3/TSCLK0 (io), 98 PC2/DT0PRI (io), 99 PC1/DT0SEC/MMCLK (io), 100 PC0/TFS0 (io), 134 ATAPI_PDIAG (out)
part B pins: 101 PA0/TFS2 (io), 102 PA1/DT2SEC/TMR4 (io), 103 PA2/DT2PRI (io), 104 PA3/TSCLK2 (io), 105 PA4/RFS2 (io), 106 PA5/DR2SEC/TMR5 (io), 107 PA6/DR2PRI (io), 108 PA7/RSCLK2/TACLK0 (io), 109 PA8/TFS3/TACLK1 (io), 110 PA9/DT3SEC/TMR6 (io), 111 PA10/DT3PRI/TACLK2 (io), 112 PA11/TSCLK3/TACLK3 (io), 113 PA12/RFS3/TACLK4 (io), 114 PA13/DR3SEC/TMR7/TACLK5 (io), 115 PA14/DR3PRI/TACLK6 (io), 116 PA15/RSCLK3/TACLK7/TACI7 (io), 119 PB0/SCL1 (io), 120 PB1/SDA1 (io), 121 PB2/RTS3 (io), 122 PB3/CTS3 (io), 123 PB4/TX2 (io), 124 PB5/RX2/TACI2 (io), 125 PB6/TX3 (io), 126 PB7/RX3/TACI3 (io), 127 PB8/~{SPI2SS}/TMR0 (io), 128 PB9/SPI2SEL1/TMR1 (io), 129 PB10/SPI2SEL2/TMR2 (io), 130 PB11/SPI2SEL3/HWAIT (io), 131 PB12/SPI2_SCLK (io), 132 PB13/SPI2_MOSI (io), 133 PB14/SPI2_MISO (io), 135 PD0/PPI1_D0/HOST_D8/TFS1/PPI0D18 (io), 136 PD1/PPI1_D1/HOST_D9/DT1SEC/PPI0_D19 (io), 137 PD2/PPI1_D2/HOST_D10/DT1PRI/PPI0_D20 (io), 138 PD3/PPI_D3/HOST_D11/TSCLK1/PPI0_D21 (io), 139 PD4/PPI1_D4/HOST_D12/RFS1/PPI0_D22 (io), 140 PD5/PPI1_D5/HOST_D13/DR1SEC/PPI0_D23 (io), 141 PD6/PPI1_D6/HOST_D14/DR1PRI (io), 142 PD7/PPI1_D7/HOST_D15/RSCLK1 (io), 143 PD8/PPI1_D8/HOST_D0/PPI2_D0/K_R0 (io), 144 PD9/PPI1_D9/HOST_D1/PPI2_D1/K_R1 (io), 145 PD10/PPI1_D10/HOST_D2/PPI2_D2/K_R2 (io), 146 PD11/PPI1_D11/HOST_D3/PPI2_D3/K_R3 (io), 147 PD12/PPI1_D12/HOST_D4/PPI2_D4/K_C0 (io), 148 PD13/PPI1_D13/HOST_D5/PPI2_D5/K_C1 (io), 149 PD14/PPI1_D14/HOST_D6/PPI2_D6/K_C2 (io), 150 PD15/PPI1_D15/HOST_D7/PPI2_D7/K_C3 (io), 151 PG15/CAN1RX/TACI5 (io), 152 PG14/CAN1TX (io), 153 PG13/CAN0RX/TACI4 (io), 154 PG12/CAN0TX (io), 155 PG11/~{SPI1SS}/~{MTXON} (io), 156 PG10/SPI1_MOSI (io), 157 PG9/SPI1_MISO (io), 158 PG8/SPI1_SCLK (io), 159 PG7/SPI1SEL3/H~{OST_WR}/PPI2_CLK (io), 160 PG6/SPI1SEL2/H~{OST_RD}/PPI2_FS1 (io), 161 PG5/SPI1SEL1/H~{OST_CE}/PPI2_FS2/CZM (io), 162 PG4/PPI0_D17 (io), 163 PG3/PPI0_D16 (io), 164 PG2/PPI0_FS2 (io), 165 PG1/PPI0_FS1 (io), 166 PG0/PPI0_CLK/TMRCLK (io), 167 PF15/PPI0_D15 (io), 168 PF14/PPI0_D14 (io), 169 PF13/PPI0_D13 (io), 170 PF12/PPI0_D12 (io), 171 PF11/PPI0_D11 (io), 172 PF10/PPI0_D10 (io), 173 PF9/PPI0_D9 (io), 174 PF8/PPI0_D8 (io), 175 PF7/PPI0_D7 (io), 176 PF6/PPI0_D6 (io), 177 PF5/PPI0_D5 (io), 178 PF4/PPI0_D4 (io), 179 PF3/PPI0_D3 (io), 180 PF2/PPI0_D2 (io), 181 PF1/PPI0_D1 (io), 182 PF0/PPI0_D0 (io), 185 PE15/SDA0 (io), 186 PE14/SCL0 (io), 187 PE13/PPI1_FS2 (io), 188 PE12/PPI1_FS1 (io), 189 PE11/PPI1_CLK (io), 190 PE10/CTS1 (io), 191 PE9/RTS1 (io), 192 PE8/RX0/TACI0 (io), 193 PE7/TX0/K_R7 (io), 194 PE6/SPI0SEL3/K_C4 (io), 195 PE5/SPI0SEL2/K_R4 (io), 196 PE4/SPI0SEL1/K_C5 (io), 197 PE3/~{SPI0SS}/K_R5 (io), 198 PE2/SPI0_MOSI/K_C6 (io), 199 PE1/SPI0_MISO/K_R6 (io), 200 PE0/SPI0_SCLK/K_C7 (io)
part C pins: 33 EXT_WAKEUP (out), 34 ~{NMI}, 51 ~{EMU} (in), 52 ~{TRST} (out), 53 TMS (out), 54 TDO (in), 55 TDI (out), 56 TCK (out), 57 BMODE3, 58 BMODE2, 59 BMODE1, 60 BMODE0, 61 GND (power), 64 GND (power), 67 ~{RESET} (out), 68 GND (power), 69 CLKBUF (out), 70 CLKOUT (out), 71 3V3 (power), 72 VccRTC (power), 73 2V5 (power), 117 3V3 (power), 118 3V3 (power), 183 GND (power), 184 GND (power), 201 GND_Shield, 202 GND_Shield, 203 GND_Shield, 204 GND_Shield, 205 GND_Shield, 206 GND_Shield, 207 GND_Shield, 208 GND_Shield, 209 GND_Shield, 210 GND_Shield, 213 GND_Shield, 214 GND_Shield, 215 GND_Shield, 216 GND_Shield, 217 GND_Shield, 218 GND_Shield, 219 GND_Shield, 220 GND_Shield, 221 GND_Shield, 222 GND_Shield

## CMP-2008-02797-1
designator C?, comment 0.01uF
AVX - 0402YC103KAT2A - SMD Multilayer Ceramic Capacitor, 0,01 uF, 16 V, 0402 [1005 Metric], ± 10%, X7R, AVX 0402 MLCC; Manufacturer: AVX Interconnect / Elco; Capacitance: 10nF; Voltage Rating (DC): 16V; Insulation Resistance: 100GR; Part Number: 0402YC103KAT2A; Supplier 1: Digi-Key; Manufacturer Part Number: 0402YC103KAT2A; RoHS: Yes; Category: Ceramic Capacitors; Stock 1: 1668180; Pricing 1: 1=0.10000, 10=0.02100, 50=0.01120, 100=0.00920, 500=0.00654, 1000=0.00514, 2500=0.00468, 5000=0.00430 (USD); Mount: Surface Mount; Case/Package: 0402; Case Code (Imperial): 0402; Case Code (Metric): 1005; Contact Plating: Tin,Matte; Min Operating Temperature: -55°C; Max Operating Temperature: 125°C; Tolerance: 10%; Dielectric: X7R; Packaging: Tape and Reel; Voltage: 16V; Voltage Rating: 16V; Package Quantity: 1; Termination: SMD/SMT; Length: 1mm; Width: 0.5mm; Height: 0.5mm; Depth: 0.5mm; Thickness: 0.022inch; Radiation Hardening: No; REACH SVHC: No SVHC; Lead Free: Lead Free; ComponentLink1URL: https://datasheet.ciiva.com/11788/0900766b80dc2409-11788541.pdf?src-supplier=RSComponents; ComponentLink1Description: https://datasheet.ciiva.com/11788/0900766b80dc2409-11788541.pdf?src-supplier=RSComponents
footprint CAP0402
pins: 1, 2
1 alternate drawing of the same symbol

## CPPT7L-BR-25.0TS
designator Y?, comment 25MHz
25MHz XO (Standard) TTL Oscillator 3.3V Enable/Disable 4-SMD, No Lead; Manufacturer: Cardinal Components Inc.; Manufacturer Product Number: CPPT7L-BR-25.0TS; Digi-Key Part Number: CPPT7L-BR-25.0TS-ND; Supplier: Cardinal Components Inc.; Frequency: 25MHz; Package / Case: 4-SMD, No Lead
footprint 4-SMD
pins: 1 CTRL, 2 GND, 3 OUT, 4 Vdd

## CR0603AJ/-000EAS
designator R?, comment 0R
Res Anti-Sulfured Jumper Thick Film 0603 0 Ohm 1/10W Molded Paper T/R; Manufacturer: Bourns; Manufacturer Part Number: CR0603AJ/-000EAS; Supplier 1: Avnet; RoHS: No; Category: Chip SMD Resistors; Stock 1: 4944; Pricing 1: 1=0.01100 (USD)
footprint RES0603
pins: 1, 2

## CRCW040210K0FHEDP
designator R?, comment 10K
10 kOhms ±1% 0.063W, 1/16W Chip Resistor 0402 (1005 Metric) Automotive AEC-Q200 Thick Film; Manufacturer: Vishay Dale; Manufacturer Product Number: CRCW040210K0FHEDP; Digi-Key Part Number: CRCW040210K0FHEDP-ND; Supplier: Vishay Dale; Package / Case: 0402; Resistance: 10K
footprint RES0402
pins: 1, 2

## CRCW040233R0JNEE
designator R?, comment 33R
33 Ohms ±5% 0.063W, 1/16W Chip Resistor 0402 (1005 Metric) Automotive AEC-Q200 Thick Film; Manufacturer: Vishay Dale; Manufacturer Product Number: CRCW040233R0JNEE; Digi-Key Part Number: CRCW040233R0JNEE-ND; Supplier: Vishay Dale; Package / Case: 0402; Resistance: 33R
footprint RES0402
pins: 1, 2

## CRCW060310M0FHEAP
designator R?, comment 10M
10 MOhms ±1% 0.1W, 1/10W Chip Resistor 0603 (1608 Metric) Automotive AEC-Q200 Thick Film; Manufacturer: Vishay Dale; Manufacturer Product Number: CRCW060310M0FHEAP; Digi-Key Part Number: CRCW060310M0FHEAP-ND; Package / Case: 0603; Resistance: 10 MOhms
footprint RES0603
pins: 1, 2

## CRGCQ0402F470K
designator R?, comment 470R
470 kOhms ±1% 0.063W, 1/16W Chip Resistor 0402 (1005 Metric) Automotive AEC-Q200, Moisture Resistant Thick Film; Manufacturer: TE Connectivity Passive Product; Manufacturer Product Number: CRGCQ0402F470K; Digi-Key Part Number: A129659TR-ND; Supplier: TE Connectivity Passive Product; Package / Case: 0402 (1005 Metric)
footprint RES0402
pins: 1, 2

## ECS-.327-12.5-17-TR
designator Y?, comment 32.768kHz
32.768kHz ±20ppm Crystal 12.5pF 50 kOhms 4-SOJ, 5.50mm pitch; Manufacturer: ECS Inc.; Manufacturer Product Number: ECS-.327-12.5-17-TR; Digi-Key Part Number: XC488TR-ND; Supplier: ECS Inc.; Frequency: 32.768kHz
footprint XTAL_ECS-.327-12.5-17-TR
pins: 1, 2, 3, 4

## FDS9926A
designator U?, comment FDS9431A
Trans MOSFET P-CH 20V 3.5A 8-Pin SOIC N T/R; Manufacturer: ON Semiconductor / Fairchild; Input Capacitance: 405pF; Max Power Dissipation: 2.5W; Rds On Max: 130mR; Rise Time: 20ns; Drain to Source Breakdown Voltage: -20V; Gate to Source Voltage (Vgs): 8V; Fall Time: 21ns; Turn-Off Delay Time: 31ns; Turn-On Delay Time: 6.5ns; Element Configuration: Single; Number of Elements: 1; Current Rating: -3.5A; Nominal Vgs: -600mV; Supplier 1: Digi-Key; Manufacturer Part Number: FDS9431A; RoHS: Yes; Category: MOSFETs; Stock 1: 2709; Pricing 1: 1=0.68000, 10=0.59800, 25=0.56160, 100=0.40750, 500=0.34046, 1000=0.28976 (USD); Mount: Surface Mount; Case/Package: SOIC; Number of Pins: 8; Weight: 0.2304g; Contact Plating: Tin,Matte; Min Operating Temperature: -55°C; Max Operating Temperature: 175°C; Packaging: Tape and Reel; Package Quantity: 2500; Drain to Source Voltage (Vdss): 20V; Continuous Drain Current (ID): 3.5A; Drain to Source Resistance: 130mR; Power Dissipation: 2.5W; Voltage Rating (DC): -20V; On-State Resistance: 130mR; Threshold Voltage: -600mV; Dual Supply Voltage: -20V; Termination: SMD/SMT; Length: 5mm; Width: 4mm; Height: 1.5mm; Radiation Hardening: No; Lead Free: Lead Free; REACH SVHC: No SVHC; ComponentLink1URL: https://datasheet.ciiva.com/1256/fds9431a-1256128.pdf?src-supplier=Newark; ComponentLink1Description: https://datasheet.ciiva.com/1256/fds9431a-1256128.pdf?src-supplier=Newark; ComponentLink2URL: https://datasheet.ciiva.com/15137/getdatasheetpartid-70130-15137336.pdf?src-supplier=Verical; ComponentLink2Description: https://datasheet.ciiva.com/15137/getdatasheetpartid-70130-15137336.pdf?src-supplier=Verical; ComponentLink3URL: https://datasheet.ciiva.com/4441/fds9431a-111226-4441596.pdf?src-supplier=Mouser; ComponentLink3Description: https://datasheet.ciiva.com/4441/fds9431a-111226-4441596.pdf?src-supplier=Mouser; ComponentLink4URL: https://datasheet.ciiva.com/932/fds9431a-932295.pdf?src-supplier=Digi-Key; ComponentLink4Description: https://datasheet.ciiva.com/932/fds9431a-932295.pdf?src-supplier=Digi-Key; ComponentLink5URL: https://datasheet.ciiva.com/932/fds9431a-932296.pdf?src-supplier=Digi-Key; ComponentLink5Description: https://datasheet.ciiva.com/932/fds9431a-932296.pdf?src-supplier=Digi-Key; ComponentLink6URL: https://datasheet.ciiva.com/8114/fds9431a-8114667.pdf?src-supplier=Avnet; ComponentLink6Description: https://datasheet.ciiva.com/8114/fds9431a-8114667.pdf?src-supplier=Avnet; ComponentLink7URL: https://datasheet.ciiva.com/932/fds9431a-932294.pdf?src-supplier=Digi-Key; ComponentLink7Description: https://datasheet.ciiva.com/932/fds9431a-932294.pdf?src-supplier=Digi-Key; ComponentLink8URL: https://datasheet.ciiva.com/26141/fds9431a-26141927.pdf?src-supplier=Avnet+Europe; ComponentLink8Description: https://datasheet.ciiva.com/26141/fds9431a-26141927.pdf?src-supplier=Avnet+Europe; ComponentLink9URL: https://datasheet.ciiva.com/8114/fds9431a-8114671.pdf?src-supplier=Avnet; ComponentLink9Description: https://datasheet.ciiva.com/8114/fds9431a-8114671.pdf?src-supplier=Avnet
footprint SOIC8
pins: 1, 2, 3, 4, 5, 6, 7, 8

## G83270022
designator Y?, comment 32.768 KHZ
32.768kHz ±10ppm Crystal 12.5pF 70 kOhms 2-SMD, No Lead; Manufacturer Product Number: G83270022; MF: Diodes Inc.; Value: 32.768kHz; Package: 2-SMD, No Lead; Load Capacitance: 12.5pF; Frequency Tolerance: ±10ppm
footprint XTAL_G83270022
pins: 1, 2

## MT46V32M16CY-5B IT:J TR
designator U?, comment MT46V32M16CY-5B IT:J
SDRAM - DDR Memory IC 512Mb (32M x 16) Parallel 200MHz 700ps 60-FBGA (8x12.5); Manufacturer: Micron Technology Inc.; Manufacturer Product Number: MT46V32M16CY-5B IT:J; Digi-Key Part Number: MT46V32M16CY-5BIT:J-ND; Package / Case: 60-TFBGA; Supplier: Micron Technology Inc.; Series: -
footprint FBGA60_10X12P5_MRN
pins: A1 VSSQ (power), A2 DQ15 (io), A3 VSS (power), A7 VDD (power), A8 DQ0 (io), A9 VDDQ (power), B1 DQ14 (io), B2 VDDQ (power), B3 DQ13 (io), B7 DQ2 (io), B8 VSSQ (power), B9 DQ1 (io), C1 DQ12 (io), C2 VSSQ (power), C3 DQ11 (io), C7 DQ4 (io), C8 VDDQ (power), C9 DQ3 (io), D1 DQ10 (io), D2 VDDQ (power), D3 DQ9 (io), D7 DQ6 (io), D8 VSSQ (power), D9 DQ5 (io), E1 DQ8 (io), E2 VSSQ (power), E3 UDQS (io), E7 LDQS (io), E8 VDDQ, E9 DQ7 (io), F1 VREF, F2 VSS (power), F3 UDM, F7 LDM, F8 VDD (power), F9 DNU, G2 CK (in), G3 ~{CK} (in), G7 ~{WE}, G8 ~{CAS}, H2 A12 (io), H3 CKE, H7 ~{RAS}, H8 ~{CS}, J2 A11 (io), J3 A9 (io), J7 BA1, J8 BA0, K2 A8 (io), K3 A7 (io), K7 A0 (io), K8 A10 (io), L2 A6 (io), L3 A5 (io), L7 A2 (io), L8 A1 (io), M2 A4 (io), M3 VSS (power), M7 VDD (power), M8 A3 (io)

## PC28F128P33BF60A
designator U?
FLASH - NOR Memory IC 128Mb (8M x 16) Parallel 52MHz 60ns 64-EasyBGA (10x13); Manufacturer: Alliance Memory, Inc.; Digi-Key Part Number: 1450-PC28F128P33BF60A-ND; Manufacturer Product Number: PC28F128P33BF60A; Supplier: Alliance Memory, Inc.; Series: StrataFlash; Package / Case: 64-TBGA
footprint BGA64_8X10_MRN
pins: A1 (io), A2 A6 (io), A3 A8 (io), A4 VPP (power), A5 A13 (io), A6 VCC (power), A7 A18 (io), A8 A22 (io), B1 A2 (io), B2 VSS, B3 A9 (io), B4 ~{CE}, B5 A14 (io), B6 RFU, B7 A19 (io), B8 RFU, C1 A3 (io), C2 A7 (io), C3 A10 (io), C4 A12 (io), C5 A15 (io), C6 ~{WP}, C7 A20 (io), C8 A21 (io), D1 A4 (io), D2 A5 (io), D3 A11 (io), D4 ~{RST}, D5 VCCQ (power), D6 VCCQ (power), D7 A16 (io), D8 A17 (io), E1 DQ8 (io), E2 DQ1 (io), E3 DQ9 (io), E4 DQ3 (io), E5 DQ4 (io), E6 CLK, E7 DQ15 (io), E8 RFU, F1 RFU, F2 DQ0 (io), F3 DQ10 (io), F4 DQ11 (io), F5 DQ12 (io), F6 ~{ADV}, F7 WAIT, F8 ~{OE}, G1 A23 (io), G2 RFU, G3 DQ2 (io), G4 VCCQ (power), G5 DQ5 (io), G6 DQ6 (io), G7 DQ14 (io), G8 ~{WE}, H1 RFU, H2 VSS, H3 VCC (power), H4 VSS, H5 DQ13 (io), H6 VSS, H7 DQ7 (io), H8 RFU

## QM2244LEV-25.0M
designator Y?, comment 25MHz
25MHz XO (Standard) CMOS, TTL Oscillator 3.3V Enable/Disable 4-SMD, No Lead; Manufacturer: Pletronics, Inc; Manufacturer Product Number: QM2244LEV-25.0M; Digi-Key Part Number: 2402-QM2244LEV-25.0M-ND; Supplier: Pletronics, Inc; Frequency: 25MHz; Package / Case: 4-SMD, No Lead
footprint 4-SMD - 2X1.5MM
pins: 1 CTRL, 2 GND, 3 OUT, 4 Vdd

## RC0402FR-070RL
designator R?, comment 0R
0 Ohms Jumper 0.063W, 1/16W Chip Resistor 0402 (1005 Metric)  Thick Film; Manufacturer: Yageo; Manufacturer Product Number: RC0402FR-070RL; Digi-Key Part Number: 311-0.0LRTR-ND; Supplier: Yageo; Package / Case: 0402; Resistance: 0R
footprint RES0402
pins: 1, 2

## RE0402FRE0710KL
designator R?, comment 10K
10 kOhms ±1% 0.063W, 1/16W Chip Resistor 0402 (1005 Metric) Moisture Resistant Thick Film; Manufacturer: Yageo; Manufacturer Product Number: RE0402FRE0710KL; Digi-Key Part Number: 13-RE0402FRE0710KLTR-ND; Supplier: Yageo; Package / Case: 0402 (1005 Metric)
footprint RES0402
pins: 1, 2

## RT0402FRE071KL
designator R?, comment 1K
1 kOhms ±1% 0.063W, 1/16W Chip Resistor 0402 (1005 Metric)  Thin Film; Manufacturer: Yageo; Part Number: RT0402FRE071KL; Resistance: 1kR; Temperature Coefficient: 50ppm/°C; Power Rating: 62.5mW; Voltage Rating: 50V; Max Power Dissipation: 63mW; Supplier 1: Digi-Key; Manufacturer Part Number: RT0402FRE071KL; RoHS: Yes; Category: Chip SMD Resistors; Stock 1: 115371; Pricing 1: 1=0.10000, 10=0.07000, 100=0.02830, 1000=0.01272, 2500=0.01104, 5000=0.00912 (USD); Case/Package: 0402; Contact Plating: Tin,Matte,Lead; Case Code (Metric): 1005; Case Code (Imperial): 0402; Min Operating Temperature: -55°C; Max Operating Temperature: 125°C; Tolerance: 1%; Resistor Type: Thin Film; Package Quantity: 10000; Packaging: Tape and Reel; Number of Terminations: 2; Termination: SMD/SMT; Voltage Rating (DC): 50V; Features: Moisture Resistant; Length: 1mm; Width: 0.02inch; Height: 0.014inch; Depth: 0.5mm; Radiation Hardening: No; Military Standard: Not; Lead Free: Lead Free; ComponentLink1URL: https://datasheet.ciiva.com/12834/pyu-rt-1-to-0-05-rohs-l-4-12834181.pdf?src-supplier=Mouser; ComponentLink1Description: https://datasheet.ciiva.com/12834/pyu-rt-1-to-0-05-rohs-l-4-12834181.pdf?src-supplier=Mouser; ComponentLink2URL: https://datasheet.ciiva.com/25647/pyu-rt-1-to-0-05-rohs-l-4-25647306.pdf?src-supplier=Digi-Key; ComponentLink2Description: https://datasheet.ciiva.com/25647/pyu-rt-1-to-0-05-rohs-l-4-25647306.pdf?src-supplier=Digi-Key; ComponentLink3URL: https://datasheet.ciiva.com/8896/pyu-rt-1-to-0-05-rohs-l-4-8896188.pdf?src-supplier=Avnet; ComponentLink3Description: https://datasheet.ciiva.com/8896/pyu-rt-1-to-0-05-rohs-l-4-8896188.pdf?src-supplier=Avnet
footprint RES0402
pins: 1, 2
1 alternate drawing of the same symbol

## T491B105M025AT
designator C?, comment 1 uF
Tantalum Capacitor, 1 uF, +/- 10%, 25 V, -55 to 125 degC, 1411 (3528 Metric), RoHS, Tape and Reel; Manufacturer: Kemet; Wire Form: NotRequired; DF: 4%; Product Diameter (mm): NotRequiredmm; Product Depth (mm): 2.8mm; Voltage: 25VDC; DCL: 0.5uA; Capacitance: 1uF; Product Height (mm): 1.9mm; ESR: 5ohm; Product Length (mm): 3.5mm; Polarity: Polar; Case Style: Molded; Package / Case: 3528-21; Failure Rate: NotRequired; Datasheet Version: 10/2016; Seal: NotRequired; Package Reference: T491-B; Insulation: NotRequired; Tolerance (+ or -): 10%; Length W/Weld: NotRequiredmm; Lead Spacing (nom): NotRequiredmm; Packaging: TapeandReel; Operating Temp Range: -55Cto125C; Case Code: B; Mounting Technology: SurfaceMount; Datasheet URL: http://capacitoredge.kemet.com/capedge2/DataSheet/Datasheet-T491B105K025AT.pdf?pn=T491B105K025AT; Construction: SMTChip; Seated Plane Height: NotRequiredmm; Manufacturer URL: http://www.kemet.com/; Mounting Style: SurfaceMount; Package Description: 2-Pin Surface Mount Device, Body 3.5 x 2.8 mm
footprint CAP_TANT_B (Molded Capacitor, 2-Leads, Body 3.70x3.00mm, IPC High Density)
pins: 1, 2

## T495C107K006ATE075
designator C?, comment 100 uF
CAP TANT 100UF 6.3V 10% 2312; Manufacturer_Part_Number: T495C107K006ATE075; Vendor: Kemet; SourceLibrary: Kemet_2020-03-25_3; Built_By: EMA_Frank; Source_Library: Kemet_2020-03-25_3.xlr; Type: DEV; Resistance: 0.075R; Leakage Current: 6.3uA; Polarity: Polar; ESR (Equivalent Series Resistance): 75mR; Ripple Current: 1.09A; Life (Hours): 2000Hour; Dissipation Factor: 8%; Copyright: Copyright (C) 2018 Accelerated Designs. All rights reserved; RefDes: RefDes; Supplier 1: Digi-Key; Manufacturer: KEMET; Manufacturer Part Number: T495C107K006ATE075; RoHS: Yes; Category: Tantalum Capacitors; Stock 1: 5300; Pricing 1: 1=1.19000, 10=0.93800, 50=0.81260, 100=0.70310 (USD); Mount: Surface Mount; Case/Package: Molded; Case Code (Metric): 6032; Case Code (Imperial): 2312; Min Operating Temperature: -55°C; Max Operating Temperature: 125°C; Termination: SMD/SMT; Packaging: Tape and Reel; Capacitance: 100uF; Tolerance: 10%; Voltage Rating: 6.3V; Package Quantity: 1; Voltage Rating (DC): 6.3V; Features: General Purpose; Length: 6mm; Width: 0.126inch; Height: 2.8mm; Height - Seated (Max): 0.11inch; Depth: 3.2mm; Radiation Hardening: No; REACH SVHC: No SVHC; ComponentLink1URL: https://datasheet.ciiva.com/23810/1744558-23810593.pdf?src-supplier=Newark; ComponentLink1Description: https://datasheet.ciiva.com/23810/1744558-23810593.pdf?src-supplier=Newark; ComponentLink2URL: https://datasheet.ciiva.com/22691/1761160-22691450.pdf?src-supplier=Element14; ComponentLink2Description: https://datasheet.ciiva.com/22691/1761160-22691450.pdf?src-supplier=Element14; ComponentLink3URL: https://datasheet.ciiva.com/22691/1744558-22691451.pdf?src-supplier=Element14; ComponentLink3Description: https://datasheet.ciiva.com/22691/1744558-22691451.pdf?src-supplier=Element14
footprint CAP_TANT_C
pins: 1, 2

## TC1262-2.5VDBTR
designator U?
Linear Voltage Regulator IC  1 Output  500mA SOT-223-3; Manufacturer: Microchip; Output Voltage: 2.5V; Dropout Voltage: 350mV; Max Input Voltage: 6V; Min Input Voltage: 2.7V; Number of Outputs: 1; Input Bias Current: 80uA; Polarity: Positive; Accuracy: 0.5%; Output Type: Fixed; Supplier 1: Digi-Key; Manufacturer Part Number: TC1262-2.5VDBTR; RoHS: Yes; Category: Voltage Regulators - Linear; Stock 1: 2386; Pricing 1: 1=0.51000, 25=0.43000, 100=0.39000 (USD); Mount: Surface Mount; Case/Package: SOT-223-3; Number of Pins: 3; Contact Plating: Tin,Matte; Min Operating Temperature: -40°C; Max Operating Temperature: 125°C; Package Quantity: 4000; Packaging: Tape and Reel; Output Current: 500mA; Max Output Current: 500mA; Number of Regulators: 1; Quiescent Current: 80uA; Radiation Hardening: No; ComponentLink1URL: https://datasheet.ciiva.com/2056/filehandler-aspxddocname-en026002-2056324.pdf?src-supplier=Digi-Key; ComponentLink1Description: https://datasheet.ciiva.com/2056/filehandler-aspxddocname-en026002-2056324.pdf?src-supplier=Digi-Key; ComponentLink2URL: https://datasheet.ciiva.com/2056/filehandler-aspxddocname-en026002-2056325.pdf?src-supplier=Digi-Key; ComponentLink2Description: https://datasheet.ciiva.com/2056/filehandler-aspxddocname-en026002-2056325.pdf?src-supplier=Digi-Key; ComponentLink3URL: https://datasheet.ciiva.com/2056/filehandler-aspxddocname-en026002-2056326.pdf?src-supplier=Digi-Key; ComponentLink3Description: https://datasheet.ciiva.com/2056/filehandler-aspxddocname-en026002-2056326.pdf?src-supplier=Digi-Key; ComponentLink4URL: https://datasheet.ciiva.com/8239/21373b-8239238.pdf?src-supplier=Avnet; ComponentLink4Description: https://datasheet.ciiva.com/8239/21373b-8239238.pdf?src-supplier=Avnet
footprint SOT-223
pins: 1 VIN, 2 GND, 3 VOUT

## TCM809SENB713
designator J?
Supervisor Push-Pull, Totem Pole 1 Channel SOT-23-3; Manufacturer: Microchip Technology; Manufacturer Product Number: TCM809SENB713; Digi-Key Part Number: TCM809SENB713TR-ND; Package / Case: TO-236-3, SC-59, SOT-23-3
footprint SOT-23B
pins: 1 GND (power), 2 ~{RESET} (out), 3 VDD (power)

## TP
designator TP?, comment Test Point
footprint TP_70MIL
pins: 0

## VLCF4020T-100MR85
designator L?
No Description Available; Manufacturer: TDK Corporation; Inductance: 10µH; Digi-Key Part Number: 445-3186-2-ND; Manufacturer Product Number: VLCF4020T-100MR85; Package / Case: Nonstandard; Size / Dimension: 4.00mm x 4.00mm x 2.00mm
footprint IND_4028_TDK
pins: 1, 2

## YC124-FR-0722RL
designator RN?
22 Ohm ±5% 62.5mW Power Per Element Isolated Resistor Network/Array ±200ppm/°C 1206 (3216 Metric), Convex, Long Side Terminals; Manufacturer: Yageo; Tolerance: ±1%; Manufacturer Product Number: YC124-FR-0722RL; Power Per Element: 62.5mW; Digi-Key Part Number: YC124-FR-0722RL
footprint RESCAXS50P200X100X55-8N
pins: 1, 2, 3, 4, 5, 6, 7, 8
text: 22R

## ZHCS1000
designator D?
DIODES INC. - ZHCS1000 - Schottky Rectifier, 40 V, 1 A, Single, SOT-23, 3 Pins, 425 mV; Max Repetitive Reverse Voltage (Vrrm): 40V; Forward Current: 1A; Reverse Recovery Time: 12ns; Forward Voltage: 425mV; Max Forward Surge Current (Ifsm): 12A; Max Power Dissipation: 500mW; Supplier 1: Newark; Manufacturer: Diodes; Manufacturer Part Number: ZHCS1000; RoHS: Yes; Category: Rectifier Diodes; Case/Package: SOT-23; Number of Pins: 3; Max Operating Temperature: 125°C; Element Configuration: Single; Packaging: Cut Tape; Termination: SMD/SMT; Width: 3.05mm; REACH SVHC: No SVHC; ComponentLink1URL: https://datasheet.ciiva.com/6932/1643161-6932065.pdf?src-supplier=Newark; ComponentLink1Description: https://datasheet.ciiva.com/6932/1643161-6932065.pdf?src-supplier=Newark; ComponentLink2URL: https://datasheet.ciiva.com/7964/312100-7964339.pdf?src-supplier=Element14; ComponentLink2Description: https://datasheet.ciiva.com/7964/312100-7964339.pdf?src-supplier=Element14
footprint SOT23_3_TOS-L
pins: 1 cathode, 2 n.c., 3 anode